# Altium footprint library WE-SHCA.PcbLib: 44 footprints (part 1 of 3)
Each footprint in its own frame and in the unit in brackets; x right, y up, seen from the top. Pads: shape width x height; smd on the part's side, far side on the other; paste and mask are expansions set on the pad; w line width, h text height; cw(c..) or ccw(c..) is an arc to the next point about the centre after c.
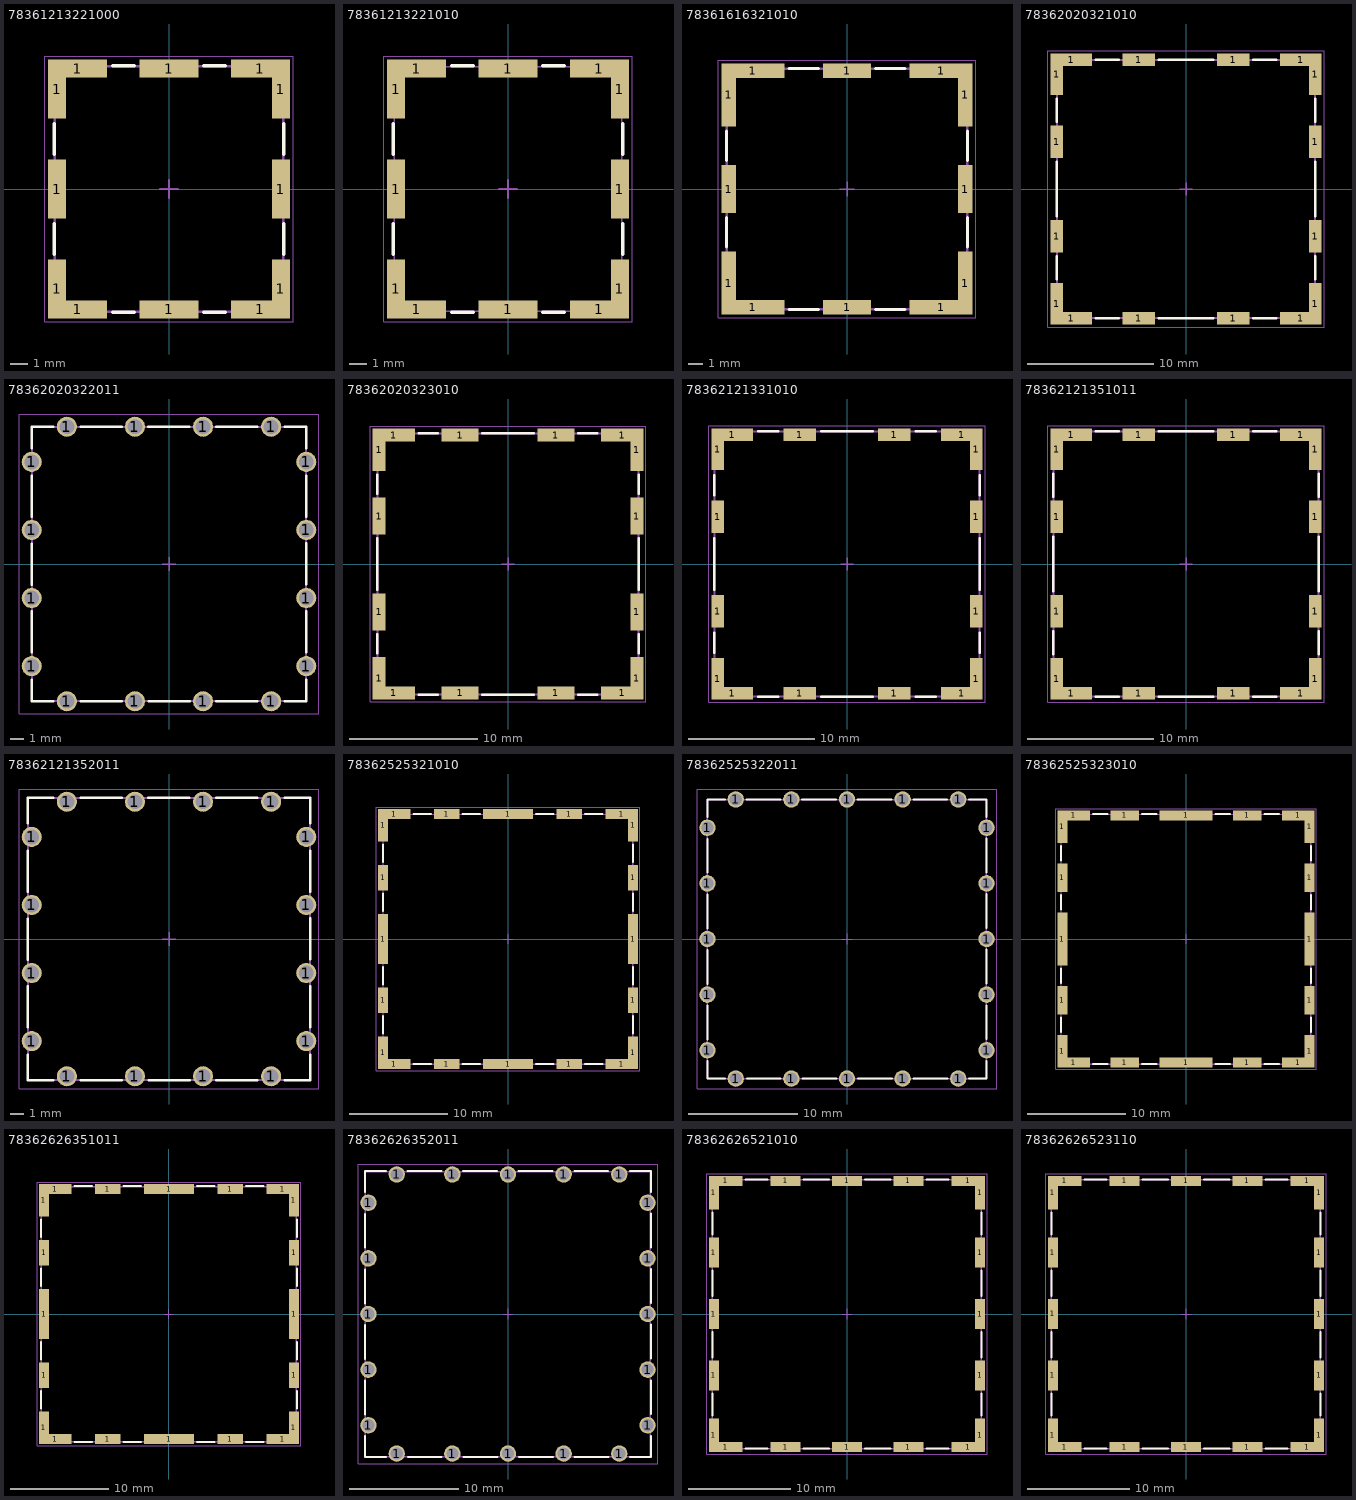
[diagram p0: the footprints below, top view; thin cyan lines are the x and y axes]

## 78361213221000 [mm] "WE-SHC Shielding Cabinet"
height 2.54
pads (12):
  rect 1x3.3 smd: 1(-6.25,-5.58) 1(-6.25,0) 1(-6.25,5.58) 1(6.25,-5.58) 1(6.25,0) 1(6.25,5.58)
  rect 3.3x1 smd: 1(-5.1,-6.73) 1(-5.1,6.73) 1(0,-6.73) 1(0,6.73) 1(5.1,-6.73) 1(5.1,6.73)
Top Overlay:
  lines w0.2: -6.4,-3.65 -6.4,-1.95 ; -6.4,1.95 -6.4,3.65 ; -3.15,-6.88 -1.95,-6.88 ; -3.15,6.88 -1.95,6.88 ; 1.95,-6.88 3.15,-6.88 ; 1.95,6.88 3.15,6.88 ; 6.4,-3.65 6.4,-1.95 ; 6.4,1.95 6.4,3.65
Top Assembly:
  lines w0.1: -6.4,-6.88 6.4,-6.88 6.4,6.88 -6.4,6.88 -6.4,-6.88
Top Designator:
  text ".Designator" at -3.647,-0.357 h1
Top 3D Body:
  lines w0.1: -6.35,-6.83 -6.35,6.83 6.35,6.83 6.35,-6.83 -6.35,-6.83
Top Courtyard:
  lines w0.05: -6.95,-7.43 6.95,-7.43 6.95,7.43 -6.95,7.43 -6.95,-7.43
Top Component Center:
  lines w0.1: -0.5,0 0.5,0 ; 0,-0.5 0,0.5
3D body "78361213221000.stp": height 2.54, standoff 0, extent -6.35,-7.08 6.35,7.08

## 78361213221010 [mm] "Shielding Cabinet, SMD Frame, body 12.7x13.66mm"
height 2.64
pads (12):
  rect 1x3.3 smd: 1(-6.25,-5.58) 1(-6.25,0) 1(-6.25,5.58) 1(6.25,-5.58) 1(6.25,0) 1(6.25,5.58)
  rect 3.3x1 smd: 1(-5.1,-6.73) 1(-5.1,6.73) 1(0,-6.73) 1(0,6.73) 1(5.1,-6.73) 1(5.1,6.73)
Top Overlay:
  lines w0.2: -6.4,-3.65 -6.4,-1.95 ; -6.4,1.95 -6.4,3.65 ; -3.15,-6.88 -1.95,-6.88 ; -3.15,6.88 -1.95,6.88 ; 1.95,-6.88 3.15,-6.88 ; 1.95,6.88 3.15,6.88 ; 6.4,-3.65 6.4,-1.95 ; 6.4,1.95 6.4,3.65
Top Assembly:
  lines w0.1: -6.35,-6.83 6.35,-6.83 6.35,6.83 -6.35,6.83 -6.35,-6.83
Top Designator:
  text ".Designator" at -3.647,-0.357 h1
Top 3D Body:
  lines w0.1: -6.35,-6.83 6.35,-6.83 6.35,6.83 -6.35,6.83 -6.35,-6.83
Top Courtyard:
  lines w0.05: -6.95,-7.43 -6.95,7.43 6.95,7.43 6.95,-7.43 -6.95,-7.43
Top Component Center:
  lines w0.1: -0.5,0 0.5,0 ; 0,-0.5 0,0.5
3D body "3610213126S.stp": height 2.55, standoff 0.01, extent -6.35,-6.83 6.35,6.83

## 78361616321010 [mm] "Shielding Cabinet, SMD Frame, body 16.5x16.5mm"
height 3.65
pads (12):
  rect 1x4.35 smd: 1(-8.15,-6.475) 1(-8.15,6.475) 1(8.15,-6.475) 1(8.15,6.475)
  rect 1x3.3 smd: 1(-8.15,0) 1(8.15,0)
  rect 4.35x1 smd: 1(-6.475,-8.15) 1(-6.475,8.15) 1(6.475,-8.15) 1(6.475,8.15)
  rect 3.3x1 smd: 1(0,-8.15) 1(0,8.15)
Top Overlay:
  lines w0.2: -8.3,-4 -8.3,-1.95 ; -8.3,1.95 -8.3,4 ; -4,-8.3 -1.95,-8.3 ; -4,8.3 -1.95,8.3 ; 1.95,-8.3 4,-8.3 ; 1.95,8.3 4,8.3 ; 8.3,-4 8.3,-1.95 ; 8.3,1.95 8.3,4
Top Assembly:
  lines w0.1: -8.3,-8.3 -8.3,8.3 8.3,8.3 8.3,-8.3 -8.3,-8.3
Top Designator:
  text ".Designator" at -3.647,-0.357 h1
Top 3D Body:
  lines w0.1: -8.25,-8.25 8.25,-8.25 8.25,8.25 -8.25,8.25 -8.25,-8.25
Top Courtyard:
  lines w0.05: -8.85,-8.85 -8.85,8.85 8.85,8.85 8.85,-8.85 -8.85,-8.85
Top Component Center:
  lines w0.1: -0.5,0 0.5,0 ; 0,-0.5 0,0.5
3D body "36103166S.stp": height 3.6, standoff 0, extent -8.25,-8.25 8.25,8.25

## 78362020321010 [mm] "Shielding Cabinet, SMD Frame, body 20.4x20.4mm"
height 3.3
pads (16):
  rect 1x3.3 smd: 1(-10.25,-9.1) 1(-10.25,9.1) 1(10.25,-9.1) 1(10.25,9.1)
  rect 1x2.6 smd: 1(-10.25,-3.75) 1(-10.25,3.75) 1(10.25,-3.75) 1(10.25,3.75)
  rect 3.3x1 smd: 1(-9.1,-10.25) 1(-9.1,10.25) 1(9.1,-10.25) 1(9.1,10.25)
  rect 2.6x1 smd: 1(-3.75,-10.25) 1(-3.75,10.25) 1(3.75,-10.25) 1(3.75,10.25)
Top Overlay:
  lines w0.2: -10.25,-7.15 -10.25,-5.35 ; -10.25,-2.15 -10.25,2.15 ; -10.25,5.35 -10.25,7.15 ; -7.15,-10.25 -5.35,-10.25 ; -7.15,10.25 -5.35,10.25 ; -2.15,-10.25 2.15,-10.25 ; -2.15,10.25 2.15,10.25 ; 5.35,-10.25 7.15,-10.25 ; 5.35,10.25 7.15,10.25 ; 10.25,-7.15 10.25,-5.35 ; 10.25,-2.15 10.25,2.15 ; 10.25,5.35 10.25,7.15
Top Assembly:
  lines w0.1: -10.25,-10.25 -10.25,10.25 10.25,10.25 10.25,-10.25 -10.25,-10.25
Top Designator:
  text ".Designator" at -3.647,-0.357 h1
Top 3D Body:
  lines w0.1: -10.2,-10.2 10.2,-10.2 10.2,10.2 -10.2,10.2 -10.2,-10.2
Top Courtyard:
  lines w0.05: -10.95,-10.95 -10.95,10.95 10.95,10.95 10.95,-10.95 -10.95,-10.95
Top Component Center:
  lines w0.1: -0.5,0 0.5,0 ; 0,-0.5 0,0.5
3D body "36103205S.stp": height 3.2, standoff 0, extent -10.2,-10.2 10.2,10.2

## 78362020322011 [mm] "Shielding Cabinet, THT Frame, body 20.4x20.4mm"
height 3.3
pads (16):
  round 1.5 hole 1.1: 1(-10.25,-7.62) 1(-10.25,-2.54) 1(-10.25,2.54) 1(-10.25,7.62) 1(-7.62,-10.25) 1(-7.62,10.25) 1(-2.54,-10.25) 1(-2.54,10.25) 1(2.54,-10.25) 1(2.54,10.25) 1(7.62,-10.25) 1(7.62,10.25) 1(10.25,-7.62) 1(10.25,-2.54) 1(10.25,2.54) 1(10.25,7.62)
Top Overlay:
  lines w0.2: -10.25,-8.65 -10.25,-10.25 -8.65,-10.25 ; -10.25,-6.59 -10.25,-3.55 ; -10.25,-1.53 -10.25,1.51 ; -10.25,3.55 -10.25,6.59 ; -10.25,8.65 -10.25,10.25 -8.65,10.25 ; -6.59,-10.25 -3.55,-10.25 ; -6.59,10.25 -3.55,10.25 ; -1.53,10.25 1.51,10.25 ; -1.51,-10.25 1.53,-10.25 ; 3.55,-10.25 6.59,-10.25 ; 3.55,10.25 6.59,10.25 ; 8.65,-10.25 10.25,-10.25 10.25,-8.65 ; 8.65,10.25 10.25,10.25 10.25,8.65 ; 10.25,-6.59 10.25,-3.55 ; 10.25,-1.51 10.25,1.53 ; 10.25,3.55 10.25,6.59
Top Assembly:
  lines w0.1: -10.25,-10.25 -10.25,10.25 10.25,10.25 10.25,-10.25 -10.25,-10.25
Top Designator:
  text ".Designator" at -3.647,-0.357 h1
Top 3D Body:
  lines w0.1: -10.2,-10.2 10.2,-10.2 10.2,10.2 -10.2,10.2 -10.2,-10.2
Top Courtyard:
  lines w0.05: -11.2,-11.2 11.2,-11.2 11.2,11.2 -11.2,11.2 -11.2,-11.2
Top Component Center:
  lines w0.1: -0.5,0 0.5,0 ; 0,-0.5 0,0.5
3D body "36503205S.stp": height 3.2, standoff -2.9, extent -10.2,-10.2 10.2,10.2

## 78362020323010 [mm] "Shielding Cabinet, body 20.4x20.4mm"
height 3.2
pads (16):
  rect 1x3.3 smd: 1(-10.1,-8.95) 1(-10.1,8.95) 1(10.1,-8.95) 1(10.1,8.95)
  rect 1x2.9 smd: 1(-10.1,-3.75) 1(-10.1,3.75) 1(10.1,-3.75) 1(10.1,3.75)
  rect 3.3x1 smd: 1(-8.95,-10.1) 1(-8.95,10.1) 1(8.95,-10.1) 1(8.95,10.1)
  rect 2.9x1 smd: 1(-3.75,-10.1) 1(-3.75,10.1) 1(3.75,-10.1) 1(3.75,10.1)
Top Overlay:
  lines w0.2: -10.25,-7 -10.25,-5.5 ; -10.25,-2 -10.25,2 ; -10.25,5.5 -10.25,7 ; -7,-10.25 -5.5,-10.25 ; -7,10.25 -5.5,10.25 ; -2,-10.25 2,-10.25 ; -2,10.25 2,10.25 ; 5.5,-10.25 7,-10.25 ; 5.5,10.25 7,10.25 ; 10.25,-7 10.25,-5.5 ; 10.25,-2 10.25,2 ; 10.25,5.5 10.25,7
Top Assembly:
  lines w0.1: -10.25,-10.25 10.25,-10.25 10.25,10.25 -10.25,10.25 -10.25,-10.25
Top Designator:
  text ".Designator" at -3.647,-0.357 h1
Top 3D Body:
  lines w0.1: -10.2,-10.2 -10.2,10.2 10.2,10.2 10.2,-10.2 -10.2,-10.2
Top Courtyard:
  lines w0.05: -10.8,-10.8 10.8,-10.8 10.8,10.8 -10.8,10.8 -10.8,-10.8
Top Component Center:
  lines w0.1: -0.5,0 0.5,0 ; 0,-0.5 0,0.5
3D body "78362020323010.stp": height 3.21, standoff 0.01, extent -10.2,-10.2 10.2,10.2

## 78362121331010 [mm] "WE-SHC Shielding Cabinet"
height 3.6
pads (16):
  rect 1x2.6 smd: 1(-10.25,-3.75) 1(-10.25,3.75) 1(10.25,-3.75) 1(10.25,3.75)
  rect 1x3.3 smd: 1(-10.25,-9.1) 1(-10.25,9.1) 1(10.25,-9.1) 1(10.25,9.1)
  rect 3.3x1 smd: 1(-9.1,-10.25) 1(-9.1,10.25) 1(9.1,-10.25) 1(9.1,10.25)
  rect 2.6x1 smd: 1(-3.75,-10.25) 1(-3.75,10.25) 1(3.75,-10.25) 1(3.75,10.25)
Top Overlay:
  lines w0.2: -10.55,-7.05 -10.55,-5.45 ; -10.55,-2.05 -10.55,2.05 ; -10.55,5.45 -10.55,7.05 ; -7.05,-10.55 -5.45,-10.55 ; -7.05,10.55 -5.45,10.55 ; -2.05,-10.55 2.05,-10.55 ; -2.05,10.55 2.05,10.55 ; 5.45,-10.55 7.05,-10.55 ; 5.45,10.55 7.05,10.55 ; 10.55,-7.05 10.55,-5.45 ; 10.55,-2.05 10.55,2.05 ; 10.55,5.45 10.55,7.05
Top Assembly:
  lines w0.1: -10.55,-10.55 10.55,-10.55 10.55,10.55 -10.55,10.55 -10.55,-10.55
Top Designator:
  text ".Designator" at -3.647,-0.357 h1
Top 3D Body:
  lines w0.1: -10.5,-10.5 -10.5,10.5 10.5,10.5 10.5,-10.5 -10.5,-10.5
Top Courtyard:
  lines w0.05: -10.95,-10.95 10.95,-10.95 10.95,10.95 -10.95,10.95 -10.95,-10.95
Top Component Center:
  lines w0.1: -0.5,0 0.5,0 ; 0,-0.5 0,0.5
3D body "78362121331010.stp": height 3.5, standoff 0, extent -10.5,-10.45 10.5,10.55

## 78362121351011 [mm] "Shielding Cabinet, SMD Frame, body 21x21mm"
height 3.6
pads (16):
  rect 1x3.3 smd: 1(-10.25,-9.1) 1(-10.25,9.1) 1(10.25,-9.1) 1(10.25,9.1)
  rect 1x2.6 smd: 1(-10.25,-3.75) 1(-10.25,3.75) 1(10.25,-3.75) 1(10.25,3.75)
  rect 3.3x1 smd: 1(-9.1,-10.25) 1(-9.1,10.25) 1(9.1,-10.25) 1(9.1,10.25)
  rect 2.6x1 smd: 1(-3.75,-10.25) 1(-3.75,10.25) 1(3.75,-10.25) 1(3.75,10.25)
Top Overlay:
  lines w0.2: -10.55,-7.15 -10.55,-5.35 ; -10.55,-2.15 -10.55,2.15 ; -10.55,5.35 -10.55,7.15 ; -7.15,-10.55 -5.35,-10.55 ; -7.15,10.55 -5.35,10.55 ; -2.15,-10.55 2.15,-10.55 ; -2.15,10.55 2.15,10.55 ; 5.35,-10.55 7.15,-10.55 ; 5.35,10.55 7.15,10.55 ; 10.55,-7.15 10.55,-5.35 ; 10.55,-2.15 10.55,2.15 ; 10.55,5.35 10.55,7.15
Top Assembly:
  lines w0.1: -10.55,-10.55 10.55,-10.55 10.55,10.55 -10.55,10.55 -10.55,-10.55
Top Designator:
  text ".Designator" at -3.647,-0.357 h1
Top 3D Body:
  lines w0.1: -10.5,-10.5 -10.5,10.5 10.5,10.5 10.5,-10.5 -10.5,-10.5
Top Courtyard:
  lines w0.05: -10.95,-10.95 10.95,-10.95 10.95,10.95 -10.95,10.95 -10.95,-10.95
Top Component Center:
  lines w0.1: -0.5,0 0.5,0 ; 0,-0.5 0,0.5
3D body "36103205 (rev1).stp": height 3.5, standoff 0, extent -10.5,-10.5 10.5,10.5

## 78362121352011 [mm] "Shielding Cabinet, THT Frame, body 21x21mm"
height 3.6
pads (16):
  round 1.5 hole 1.1: 1(-10.25,-7.62) 1(-10.25,-2.54) 1(-10.25,2.54) 1(-10.25,7.62) 1(-7.62,-10.25) 1(-7.62,10.25) 1(-2.54,-10.25) 1(-2.54,10.25) 1(2.54,-10.25) 1(2.54,10.25) 1(7.62,-10.25) 1(7.62,10.25) 1(10.25,-7.62) 1(10.25,-2.54) 1(10.25,2.54) 1(10.25,7.62)
Top Overlay:
  lines w0.2: -10.55,-8.65 -10.55,-10.55 -8.65,-10.55 ; -10.55,-6.59 -10.55,-3.55 ; -10.55,-1.53 -10.55,1.51 ; -10.55,3.55 -10.55,6.59 ; -10.55,8.65 -10.55,10.55 -8.65,10.55 ; -6.59,-10.55 -3.55,-10.55 ; -6.59,10.55 -3.55,10.55 ; -1.53,10.55 1.51,10.55 ; -1.51,-10.55 1.53,-10.55 ; 3.55,-10.55 6.59,-10.55 ; 3.55,10.55 6.59,10.55 ; 8.65,-10.55 10.55,-10.55 10.55,-8.65 ; 8.65,10.55 10.55,10.55 10.55,8.65 ; 10.55,-6.59 10.55,-3.55 ; 10.55,-1.51 10.55,1.53 ; 10.55,3.55 10.55,6.59
Top Assembly:
  lines w0.1: -10.55,-10.55 -10.55,10.55 10.55,10.55 10.55,-10.55 -10.55,-10.55
Top Designator:
  text ".Designator" at -3.647,-0.357 h1
Top 3D Body:
  lines w0.1: -10.5,-10.5 10.5,-10.5 10.5,10.5 -10.5,10.5 -10.5,-10.5
Top Courtyard:
  lines w0.05: -11.2,-11.2 -11.2,11.2 11.2,11.2 11.2,-11.2 -11.2,-11.2
Top Component Center:
  lines w0.1: -0.5,0 0.5,0 ; 0,-0.5 0,0.5
3D body "36503205.stp": height 3.5, standoff -2.9, extent -10.5,-10.5 10.5,10.5

## 78362525321010 [mm] "Shielding Cabinet, SMD Frame, 25.4x25.4mm"
height 3.3
pads (20):
  rect 1x3.3 smd: 1(-12.75,-11.6) 1(-12.75,11.6) 1(12.75,-11.6) 1(12.75,11.6)
  rect 1x2.6 smd: 1(-12.75,-6.25) 1(-12.75,6.25) 1(12.75,-6.25) 1(12.75,6.25)
  rect 1x5.1 smd: 1(-12.75,0) 1(12.75,0)
  rect 3.3x1 smd: 1(-11.6,-12.75) 1(-11.6,12.75) 1(11.6,-12.75) 1(11.6,12.75)
  rect 2.6x1 smd: 1(-6.25,-12.75) 1(-6.25,12.75) 1(6.25,-12.75) 1(6.25,12.75)
  rect 5.1x1 smd: 1(0,-12.75) 1(0,12.75)
Top Overlay:
  lines w0.2: -12.75,-9.65 -12.75,-7.85 ; -12.75,-4.65 -12.75,-2.85 ; -12.75,2.85 -12.75,4.65 ; -12.75,7.85 -12.75,9.65 ; -9.65,-12.75 -7.85,-12.75 ; -9.65,12.75 -7.85,12.75 ; -4.65,-12.75 -2.85,-12.75 ; -4.65,12.75 -2.85,12.75 ; 2.85,-12.75 4.65,-12.75 ; 2.85,12.75 4.65,12.75 ; 7.85,-12.75 9.65,-12.75 ; 7.85,12.75 9.65,12.75 ; 12.75,-9.65 12.75,-7.85 ; 12.75,-4.65 12.75,-2.85 ; 12.75,2.85 12.75,4.65 ; 12.75,7.85 12.75,9.65
Top Assembly:
  lines w0.1: -12.75,-12.75 12.75,-12.75 12.75,12.75 -12.75,12.75 -12.75,-12.75
Top Designator:
  text ".Designator" at -3.647,-0.357 h1
Top 3D Body:
  lines w0.1: -12.7,-12.7 -12.7,12.7 12.7,12.7 12.7,-12.7 -12.7,-12.7
Top Courtyard:
  lines w0.05: -13.45,-13.45 13.45,-13.45 13.45,13.45 -13.45,13.45 -13.45,-13.45
Top Component Center:
  lines w0.1: -0.5,0 0.5,0 ; 0,-0.5 0,0.5
3D body "36103255S.stp": height 3.2, standoff 0, extent -12.7,-12.7 12.7,12.7

## 78362525322011 [mm] "Shielding Cabinet, THT Frame, body 25.4x25.4mm"
height 3.3
pads (20):
  round 1.5 hole 1.1: 1(-12.75,-10.16) 1(-12.75,-5.08) 1(-12.75,0) 1(-12.75,5.08) 1(-12.75,10.16) 1(-10.16,-12.75) 1(-10.16,12.75) 1(-5.08,-12.75) 1(-5.08,12.75) 1(0,-12.75) 1(0,12.75) 1(5.08,-12.75) 1(5.08,12.75) 1(10.16,-12.75) 1(10.16,12.75) 1(12.75,-10.16) 1(12.75,-5.08) 1(12.75,0) 1(12.75,5.08) 1(12.75,10.16)
Top Overlay:
  lines w0.2: -12.75,-11.15 -12.75,-12.75 -11.15,-12.75 ; -12.75,-9.17 -12.75,-6.1 ; -12.75,-4.09 -12.75,-1.02 ; -12.75,0.99 -12.75,4.06 ; -12.75,6.07 -12.75,9.14 ; -12.75,11.15 -12.75,12.75 -11.15,12.75 ; -9.17,12.75 -6.1,12.75 ; -9.14,-12.75 -6.07,-12.75 ; -4.09,12.75 -1.02,12.75 ; -4.06,-12.75 -0.99,-12.75 ; 0.99,12.75 4.06,12.75 ; 1.02,-12.75 4.09,-12.75 ; 6.07,12.75 9.14,12.75 ; 6.1,-12.75 9.17,-12.75 ; 11.15,-12.75 12.75,-12.75 12.75,-11.15 ; 11.15,12.75 12.75,12.75 12.75,11.15 ; 12.75,-9.14 12.75,-6.07 ; 12.75,-4.06 12.75,-0.99 ; 12.75,1.02 12.75,4.09 ; 12.75,6.1 12.75,9.17
Top Assembly:
  lines w0.1: -12.75,-12.75 12.75,-12.75 12.75,12.75 -12.75,12.75 -12.75,-12.75
Top Designator:
  text ".Designator" at -3.647,-0.357 h1
Top 3D Body:
  lines w0.1: -12.7,-12.7 -12.7,12.7 12.7,12.7 12.7,-12.7 -12.7,-12.7
Top Courtyard:
  lines w0.05: -13.7,-13.7 -13.7,13.7 13.7,13.7 13.7,-13.7 -13.7,-13.7
Top Component Center:
  lines w0.1: -0.5,0 0.5,0 ; 0,-0.5 0,0.5
3D body "36503255S.stp": height 3.2, standoff -2.9, extent -12.7,-12.7 12.7,12.7

## 78362525323010 [mm] "Shielding Cabinet, body 25.4x25.4mm"
height 3.2
pads (20):
  rect 1x3.3 smd: 1(-12.6,-11.45) 1(-12.6,11.45) 1(12.6,-11.45) 1(12.6,11.45)
  rect 1x2.9 smd: 1(-12.6,-6.25) 1(-12.6,6.25) 1(12.6,-6.25) 1(12.6,6.25)
  rect 1x5.4 smd: 1(-12.6,0) 1(12.6,0)
  rect 3.3x1 smd: 1(-11.45,-12.6) 1(-11.45,12.6) 1(11.45,-12.6) 1(11.45,12.6)
  rect 2.9x1 smd: 1(-6.25,-12.6) 1(-6.25,12.6) 1(6.25,-12.6) 1(6.25,12.6)
  rect 5.4x1 smd: 1(0,-12.6) 1(0,12.6)
Top Overlay:
  lines w0.2: -12.75,-9.5 -12.75,-8 ; -12.75,-4.5 -12.75,-3 ; -12.75,3 -12.75,4.5 ; -12.75,8 -12.75,9.5 ; -9.5,-12.75 -8,-12.75 ; -9.5,12.75 -8,12.75 ; -4.5,-12.75 -3,-12.75 ; -4.5,12.75 -3,12.75 ; 3,-12.75 4.5,-12.75 ; 3,12.75 4.5,12.75 ; 8,-12.75 9.5,-12.75 ; 8,12.75 9.5,12.75 ; 12.75,-9.5 12.75,-8 ; 12.75,-4.5 12.75,-3 ; 12.75,3 12.75,4.5 ; 12.75,8 12.75,9.5
Top Assembly:
  lines w0.1: -12.75,-12.75 12.75,-12.75 12.75,12.75 -12.75,12.75 -12.75,-12.75
Top Designator:
  text ".Designator" at -3.647,-0.357 h1
Top 3D Body:
  lines w0.1: -12.7,-12.7 -12.7,12.7 12.7,12.7 12.7,-12.7 -12.7,-12.7
Top Courtyard:
  lines w0.05: -13.3,-13.3 13.3,-13.3 13.3,13.3 -13.3,13.3 -13.3,-13.3
Top Component Center:
  lines w0.1: -0.5,0 0.5,0 ; 0,-0.5 0,0.5
3D body "36903255S.stp": height 3.2, standoff 0, extent -12.7,-12.7 12.7,12.7

## 78362626351011 [mm] "Shielding Cabinet, SMD Frame, body 26x26mm"
height 3.6
pads (20):
  rect 1x3.3 smd: 1(-12.75,-11.6) 1(-12.75,11.6) 1(12.75,-11.6) 1(12.75,11.6)
  rect 1x2.6 smd: 1(-12.75,-6.25) 1(-12.75,6.25) 1(12.75,-6.25) 1(12.75,6.25)
  rect 1x5.1 smd: 1(-12.75,0) 1(12.75,0)
  rect 3.3x1 smd: 1(-11.6,-12.75) 1(-11.6,12.75) 1(11.6,-12.75) 1(11.6,12.75)
  rect 2.6x1 smd: 1(-6.25,-12.75) 1(-6.25,12.75) 1(6.25,-12.75) 1(6.25,12.75)
  rect 5.1x1 smd: 1(0,-12.75) 1(0,12.75)
Top Overlay:
  lines w0.2: -13.05,-9.65 -13.05,-7.85 ; -13.05,-4.65 -13.05,-2.85 ; -13.05,2.85 -13.05,4.65 ; -13.05,7.85 -13.05,9.65 ; -9.65,-13.05 -7.85,-13.05 ; -9.65,13.05 -7.85,13.05 ; -4.65,-13.05 -2.85,-13.05 ; -4.65,13.05 -2.85,13.05 ; 2.85,-13.05 4.65,-13.05 ; 2.85,13.05 4.65,13.05 ; 7.85,-13.05 9.65,-13.05 ; 7.85,13.05 9.65,13.05 ; 13.05,-9.65 13.05,-7.85 ; 13.05,-4.65 13.05,-2.85 ; 13.05,2.85 13.05,4.65 ; 13.05,7.85 13.05,9.65
Top Assembly:
  lines w0.1: -13.05,-13.05 -13.05,13.05 13.05,13.05 13.05,-13.05 -13.05,-13.05
Top Designator:
  text ".Designator" at -3.647,-0.357 h1
Top 3D Body:
  lines w0.1: -13,-13 13,-13 13,13 -13,13 -13,-13
Top Courtyard:
  lines w0.05: -13.45,-13.45 -13.45,13.45 13.45,13.45 13.45,-13.45 -13.45,-13.45
Top Component Center:
  lines w0.1: -0.5,0 0.5,0 ; 0,-0.5 0,0.5
3D body "36103255.stp": height 3.5, standoff 0, extent -13,-13 13,13

## 78362626352011 [mm] "Shielding Cabinet, THT Frame, body 26x26mm"
height 3.6
pads (20):
  round 1.5 hole 1.1: 1(-12.75,-10.16) 1(-12.75,-5.08) 1(-12.75,0) 1(-12.75,5.08) 1(-12.75,10.16) 1(-10.16,-12.75) 1(-10.16,12.75) 1(-5.08,-12.75) 1(-5.08,12.75) 1(0,-12.75) 1(0,12.75) 1(5.08,-12.75) 1(5.08,12.75) 1(10.16,-12.75) 1(10.16,12.75) 1(12.75,-10.16) 1(12.75,-5.08) 1(12.75,0) 1(12.75,5.08) 1(12.75,10.16)
Top Overlay:
  lines w0.2: -13.05,-11.15 -13.05,-13.05 -11.15,-13.05 ; -13.05,-9.17 -13.05,-6.1 ; -13.05,-4.09 -13.05,-1.02 ; -13.05,0.99 -13.05,4.06 ; -13.05,6.07 -13.05,9.14 ; -13.05,11.15 -13.05,13.05 -11.15,13.05 ; -9.17,13.05 -6.1,13.05 ; -9.14,-13.05 -6.07,-13.05 ; -4.09,13.05 -1.02,13.05 ; -4.06,-13.05 -0.99,-13.05 ; 0.99,13.05 4.06,13.05 ; 1.02,-13.05 4.09,-13.05 ; 6.07,13.05 9.14,13.05 ; 6.1,-13.05 9.17,-13.05 ; 11.15,-13.05 13.05,-13.05 13.05,-11.15 ; 11.15,13.05 13.05,13.05 13.05,11.15 ; 13.05,-9.14 13.05,-6.07 ; 13.05,-4.06 13.05,-0.99 ; 13.05,1.02 13.05,4.09 ; 13.05,6.1 13.05,9.17
Top Assembly:
  lines w0.1: -13.05,-13.05 13.05,-13.05 13.05,13.05 -13.05,13.05 -13.05,-13.05
Top Designator:
  text ".Designator" at -3.647,-0.357 h1
Top 3D Body:
  lines w0.1: -13,-13 -13,13 13,13 13,-13 -13,-13
Top Courtyard:
  lines w0.05: -13.7,-13.7 13.7,-13.7 13.7,13.7 -13.7,13.7 -13.7,-13.7
Top Component Center:
  lines w0.1: -0.5,0 0.5,0 ; 0,-0.5 0,0.5
3D body "36503255.stp": height 3.5, standoff -2.9, extent -13,-13 13,13

## 78362626521010 [mm] "Shielding Cabinet, SMD Frame, body 26.21x26.21mm"
height 5.18
pads (20):
  rect 1x3.3 smd: 1(-13.005,-11.855) 1(-13.005,11.855) 1(13.005,-11.855) 1(13.005,11.855)
  rect 1x2.9 smd: 1(-13.005,-6) 1(-13.005,0) 1(-13.005,6) 1(13.005,-6) 1(13.005,0) 1(13.005,6)
  rect 3.3x1 smd: 1(-11.855,-13.005) 1(-11.855,13.005) 1(11.855,-13.005) 1(11.855,13.005)
  rect 2.9x1 smd: 1(-6,-13.005) 1(-6,13.005) 1(0,-13.005) 1(0,13.005) 1(6,-13.005) 1(6,13.005)
Top Overlay:
  lines w0.2: -13.155,-9.9 -13.155,-7.75 ; -13.155,-4.25 -13.155,-1.75 ; -13.155,1.75 -13.155,4.25 ; -13.155,7.75 -13.155,9.9 ; -9.9,-13.155 -7.75,-13.155 ; -9.9,13.155 -7.75,13.155 ; -4.25,-13.155 -1.75,-13.155 ; -4.25,13.155 -1.75,13.155 ; 1.75,-13.155 4.25,-13.155 ; 1.75,13.155 4.25,13.155 ; 7.75,-13.155 9.9,-13.155 ; 7.75,13.155 9.9,13.155 ; 13.155,-9.9 13.155,-7.75 ; 13.155,-4.25 13.155,-1.75 ; 13.155,1.75 13.155,4.25 ; 13.155,7.75 13.155,9.9
Top Assembly:
  lines w0.1: -13.155,-13.155 -13.155,13.155 13.155,13.155 13.155,-13.155 -13.155,-13.155
Top Designator:
  text ".Designator" at -3.647,-0.357 h1
Top 3D Body:
  lines w0.1: -13.105,-13.105 13.105,-13.105 13.105,13.105 -13.105,13.105 -13.105,-13.105
Top Courtyard:
  lines w0.05: -13.705,-13.705 -13.705,13.705 13.705,13.705 13.705,-13.705 -13.705,-13.705
Top Component Center:
  lines w0.1: -0.5,0 0.5,0 ; 0,-0.5 0,0.5
3D body "36105266S.stp": height 5.09, standoff 0.01, extent -13.105,-13.105 13.105,13.105

## 78362626523110 [mm] "Shielding Cabinet, body 26.21x26.21mm"
height 5.08
pads (20):
  rect 1x3.3 smd: 1(-13.005,-11.855) 1(-13.005,11.855) 1(13.005,-11.855) 1(13.005,11.855)
  rect 1x2.9 smd: 1(-13.005,-6) 1(-13.005,0) 1(-13.005,6) 1(13.005,-6) 1(13.005,0) 1(13.005,6)
  rect 3.3x1 smd: 1(-11.855,-13.005) 1(-11.855,13.005) 1(11.855,-13.005) 1(11.855,13.005)
  rect 2.9x1 smd: 1(-6,-13.005) 1(-6,13.005) 1(0,-13.005) 1(0,13.005) 1(6,-13.005) 1(6,13.005)
Top Overlay:
  lines w0.2: -13.155,-9.9 -13.155,-7.75 ; -13.155,-4.25 -13.155,-1.75 ; -13.155,1.75 -13.155,4.25 ; -13.155,7.75 -13.155,9.9 ; -9.9,-13.155 -7.75,-13.155 ; -9.9,13.155 -7.75,13.155 ; -4.25,-13.155 -1.75,-13.155 ; -4.25,13.155 -1.75,13.155 ; 1.75,-13.155 4.25,-13.155 ; 1.75,13.155 4.25,13.155 ; 7.75,-13.155 9.9,-13.155 ; 7.75,13.155 9.9,13.155 ; 13.155,-9.9 13.155,-7.75 ; 13.155,-4.25 13.155,-1.75 ; 13.155,1.75 13.155,4.25 ; 13.155,7.75 13.155,9.9
Top Assembly:
  lines w0.1: -13.155,-13.155 -13.155,13.155 13.155,13.155 13.155,-13.155 -13.155,-13.155
Top Designator:
  text ".Designator" at -3.647,-0.357 h1
Top 3D Body:
  lines w0.1: -13.105,-13.105 13.105,-13.105 13.105,13.105 -13.105,13.105 -13.105,-13.105
Top Courtyard:
  lines w0.05: -13.705,-13.705 -13.705,13.705 13.705,13.705 13.705,-13.705 -13.705,-13.705
Top Component Center:
  lines w0.1: -0.5,0 0.5,0 ; 0,-0.5 0,0.5
3D body "36905266S.stp": height 5.08, standoff 0, extent -13.105,-13.105 13.105,13.105